# Altium schematic symbol library 10µF、100V、±20%、105℃_100YXJ10M6.3X11.SCHLIB: 1 symbol
Pins are listed as number, name and electrical type; pins without a type are passive.

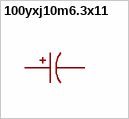
[diagram p0: symbol 100yxj10m6.3x11]

## 100yxj10m6.3x11
designator C??  (value not drawn)
容值:10uF;精度:±20%;额定电压:100V;纹波电流:112.14mA@120Hz;等效串联电阻(ESR):570mΩ;; Manufacturer: Rubycon(红宝石); AddInBom: yes; ModelId: 3cdd55eab6a840dba93006d5a727d063; ModelName: CAP-TH_BD6.3-P2.50-D0.6-FD; ModelTransform: 247.778,247.90446,0,0,0,0,0,0,-137.795; Value: 10uF; Tolerance: ±20%; Voltage Rating: 100V; Equivalent Series Resistance(ESR): 570mΩ; Pin Spacing: 2.5mm; Lifetime: 7000hrs@105℃; Symbol: 100YXJ10M6.3X11; LCSC Part Name: 10uF ±20% 100V; SupplierPart: C1668981; ManufacturerPart: 100YXJ10M6.3X11; Supplier Footprint: 插件,D6.3xL11mm; JLCPCB Part Class: Extended Part; Supplier: LCSC; ConvertToPcb: yes; FootprintName: CAP-TH_BD6.3-P2.50-D0.6-FD; Ripple Current: 112.14mA@120Hz; Diameter: 6.3mm; Height - Seated (Max): 11mm; Operating Temperature: -40℃~+105℃
footprint CAP-TH_BD6.3-P2.50-D0.6-FD
pins: 1, 2